# Altium footprint library PcbLib1.PcbLib: 10 footprints
Each footprint in its own frame and in the unit in brackets; x right, y up, seen from the top. Pads: shape width x height; smd on the part's side, far side on the other; paste and mask are expansions set on the pad; w line width, h text height; cw(c..) or ccw(c..) is an arc to the next point about the centre after c.
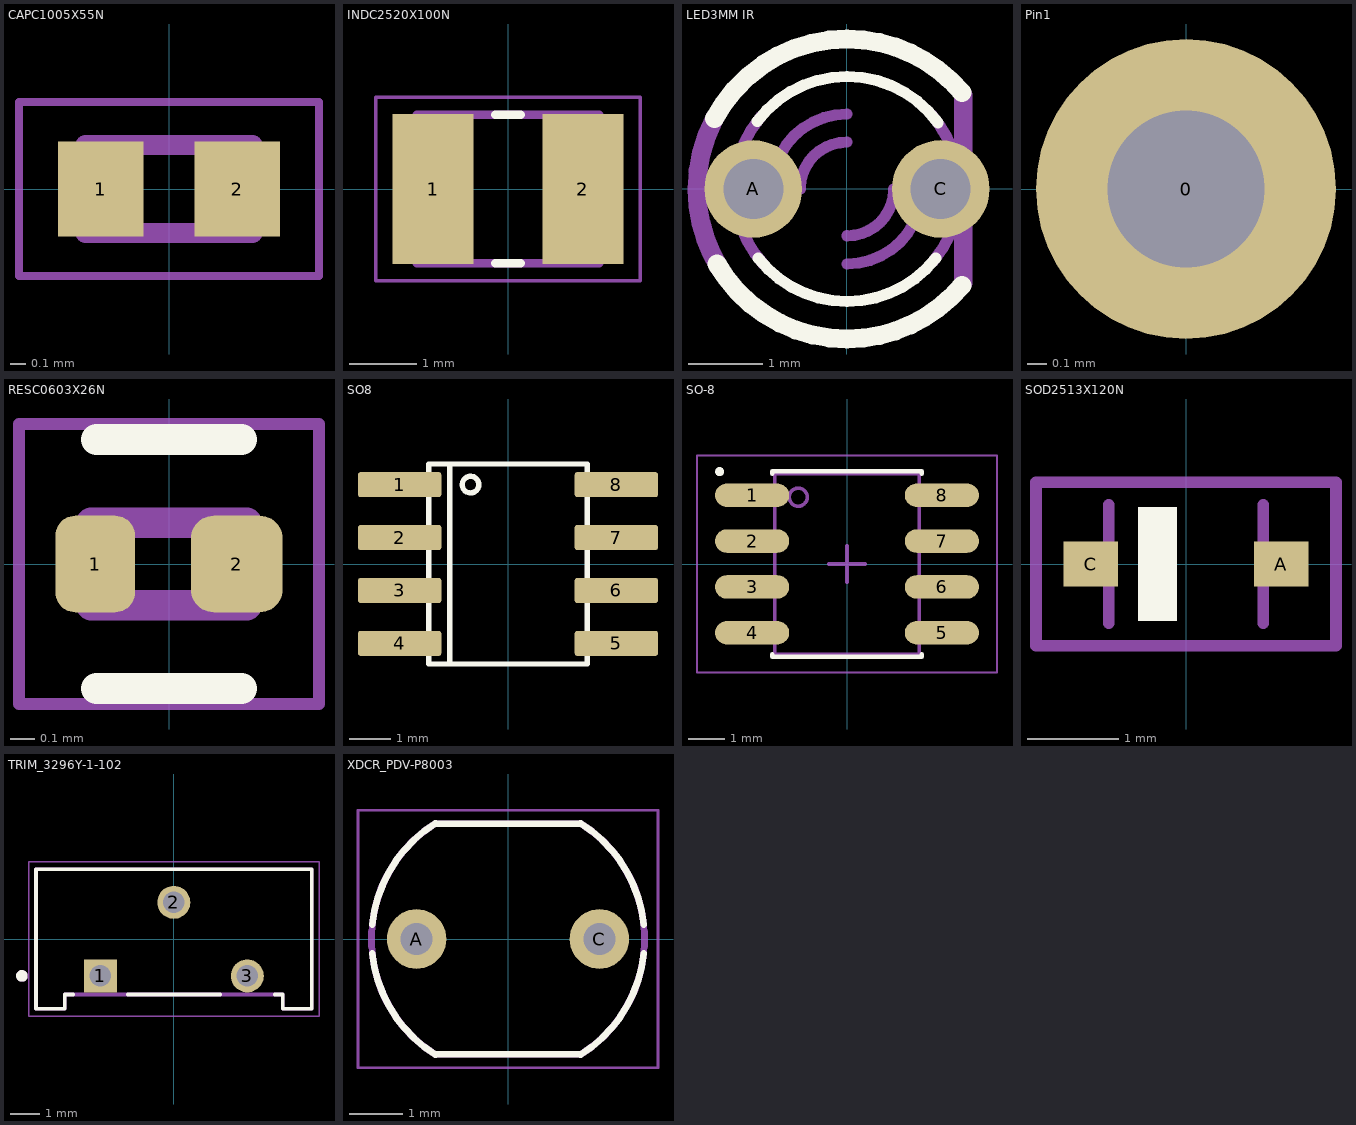
[diagram p0: the footprints below, top view; thin cyan lines are the x and y axes]

## CAPC1005X55N [mm]
pads (2):
  rect 0.54x0.6 smd: 1(-0.432,0) 2(0.432,0)
Mechanical 13:
  lines w0.127: -0.53,-0.28 0.53,-0.28 0.53,0.28 -0.53,0.28 -0.53,-0.28
Top Courtyard:
  lines w0.05: -0.95,-0.55 0.95,-0.55 0.95,0.55 -0.95,0.55 -0.95,-0.55
3D body "step_temp.STEP": height 0.55, standoff 0, extent -0.5,-0.25 0.5,0.25

## INDC2520X100N [mm]
pads (2):
  rect 1.2x2.22 smd: 1(-1.11,0) 2(1.11,0)
Top Overlay:
  lines w0.127: -0.19,-1.1 0.19,-1.1 ; -0.19,1.1 0.19,1.1
Mechanical 13:
  lines w0.127: -1.35,-1.1 -1.35,1.1 1.35,1.1 1.35,-1.1 -1.35,-1.1
Top Courtyard:
  lines w0.05: -1.958,-1.358 -1.958,1.358 1.958,1.358 1.958,-1.358 -1.958,-1.358
3D body "step_temp.STEP": height 1, standoff 0, extent -1.25,-1 1.25,1

## LED3MM IR [mil]
pads (2):
  round 52 hole 32: A(-50,0) C(50,0)
Top Overlay:
  lines w6: -47.92,36.11 cw(c0,0) 0,60 cw(c0,0) 48.54,35.27 ; -47.28,-36.94 ccw(c0,0) 0,-60 ccw(c0,0) 47.28,-36.94
  lines w10: -70.63,37.56 cw(c0,0) 0,80 cw(c0,0) 61.28,51.42 ; -69.28,-40 ccw(c0,0) 0,-80 ccw(c0,0) 61.29,-51.42
Mechanical 13:
  lines w6: -45.96,38.57 ccw(c0,0) -60,0 ccw(c0,0) -44.59,-40.15 ; -40,0 cw(c0,0) 0,40 ; -25,0 cw(c0,0) 0,25 ; 0,-40 ccw(c0,0) 40,0 ; 0,-25 ccw(c0,0) 25,0 ; 45.28,39.36 cw(c0,0) 60,0 cw(c0,0) 45.96,-38.57
  lines w10: -70.64,37.56 ccw(c0,0) -80,0 ccw(c0,0) -67.84,-42.4 ; 62,-50 62,50
3D body "step_temp.STEP": height 240.16, standoff -1133.86, extent -59.84,-62.49 59.84,62.49

## Pin1 [mil]
pads (1):
  round 60 hole 31.5: 0(0,0)

## RESC0603X26N [mm]
pads (2):
  rrect50% 0.33x0.4 smd: 1(-0.305,0)
  rrect50% 0.38x0.4 smd: 2(0.28,0)
Top Overlay:
  lines w0.127: -0.3,-0.515 0.3,-0.515 ; -0.3,0.515 0.3,0.515
Mechanical 13:
  lines w0.127: -0.32,-0.17 -0.32,0.17 0.32,0.17 0.32,-0.17 -0.32,-0.17
Top Courtyard:
  lines w0.05: -0.62,-0.579 -0.62,0.579 0.62,0.579 0.62,-0.579 -0.62,-0.579
3D body "step_temp.STEP": height 0.26, standoff 0, extent -0.3,-0.15 0.3,0.15

## SO8 [mm]
pads (8):
  rrect20% 2x0.6 smd paste+0 mask+0.102: 1(-2.6,1.905) 2(-2.6,0.635) 3(-2.6,-0.635) 4(-2.6,-1.905) 5(2.6,-1.905) 6(2.6,-0.635) 7(2.6,0.635) 8(2.6,1.905)
Top Overlay:
  circle w0.127: c-0.9,1.905 r0.2
  lines w0.127: -1.4,-2.4 -1.9,-2.4 -1.9,2.4 -1.4,2.4 ; -1.4,-2.4 1.9,-2.4 1.9,2.4 -1.4,2.4 ; -1.4,-2.4 -1.4,2.4
Mechanical 13:
  region: 3.1,1.66 2,1.66 2,2.15 3.1,2.15
  region: 3.1,0.39 2,0.39 2,0.88 3.1,0.88
  region: 3.1,-0.88 2,-0.88 2,-0.39 3.1,-0.39
  region: 3.1,-2.15 2,-2.15 2,-1.66 3.1,-1.66
  region: -2,-2.15 -3.1,-2.15 -3.1,-1.66 -2,-1.66
  region: -2,-0.88 -3.1,-0.88 -3.1,-0.39 -2,-0.39
  region: -2,0.39 -3.1,0.39 -3.1,0.88 -2,0.88
  region: -2,1.66 -3.1,1.66 -3.1,2.15 -2,2.15
3D body "step_temp.STEP": height 1.75, standoff 0, extent -3,-2.45 3,2.45

## SO-8 [mm] "SOP, 8-Leads, Body 4,90x3,90mm, Pitch 1,27mm, IPC Low Density"
height 1.75
pads (8):
  oval 2.05x0.65 smd: 1(-2.625,1.905) 2(-2.625,0.635) 3(-2.625,-0.635) 4(-2.625,-1.905) 5(2.625,-1.905) 6(2.625,-0.635) 7(2.625,0.635) 8(2.625,1.905)
Top Overlay:
  circle w0.125: c-3.525,2.555 r0.062
  lines w0.127: -2.064,-2.494 -2.064,-2.564 2.063,-2.564 2.063,-2.494 ; -2.064,2.494 -2.064,2.564 2.063,2.564 2.063,2.494
Top Assembly:
  circle w0.1: c-1.35,1.85 r0.25
  lines w0.1: -2,-2.5 2,-2.5 2,2.5 -2,2.5 -2,-2.5
Top Designator:
  text ".Designator" at 0,0.188 h1
Top Courtyard:
  lines w0.05: -4.15,-3 4.15,-3 4.15,3 -4.15,3 -4.15,-3
Top Component Center:
  lines w0.1: -0.5,0 0.5,0 ; 0,-0.5 0,0.5
3D body "SO-8.step": height 1.75, standoff 0, extent -3,-2.45 3,2.45

## SOD2513X120N [mm]
pads (2):
  rect 0.6x0.5 smd: A(1.05,0) C(-1.05,0)
Top Overlay:
  region: -0.1,-0.626 -0.526,-0.626 -0.526,0.625 -0.1,0.625
Mechanical 13:
  lines w0.127: -0.85,-0.65 -0.85,0.65 ; 0.85,-0.65 0.85,0.65
Top Courtyard:
  lines w0.127: -1.65,-0.9 -1.65,0.9 1.65,0.9 1.65,-0.9 -1.65,-0.9
3D body "step_temp.STEP": height 1.2, standoff 0, extent -1.25,-0.65 1.25,0.65

## TRIM_3296Y-1-102 [mm]
height 11.8
pads (3):
  rect 1.14x1.14 / inner round 1.14 / far side rect 1.14x1.14 hole 0.74: 1(-2.54,-1.27)
  round 1.14 hole 0.74: 2(0,1.27) 3(2.54,-1.27)
Top Overlay:
  circle w0.2: c-5.25,-1.27 r0.1
  lines w0.127: -3.484,-1.91 -3.765,-1.91 -3.765,-2.41 -4.765,-2.41 -4.765,2.42 4.765,2.42 4.765,-2.41 3.765,-2.41 3.765,-1.91 3.484,-1.91 ; -1.596,-1.91 1.596,-1.91
Mechanical 13:
  circle w0.2: c-5.25,-1.27 r0.1
  lines w0.127: -4.765,-2.41 -3.765,-2.41 -3.765,-1.91 3.765,-1.91 3.765,-2.41 4.765,-2.41 4.765,2.42 -4.765,2.42 -4.765,-2.41
Top Courtyard:
  lines w0.05: -5.015,-2.66 -5.015,2.67 5.015,2.67 5.015,-2.66 -5.015,-2.66
3D body "step_temp.STEP": height 11.55, standoff -7.72, extent -4.765,-2.415 4.765,2.415

## XDCR_PDV-P8003 [mm]
pads (2):
  round 1.108 hole 0.6: A(-1.7,0) C(1.7,0)
Top Overlay:
  lines w0.127: -2.526,-0.265 ccw(c0.001,0.001) -1.346,-2.154 ; -2.526,0.265 cw(c0.001,-0.001) -1.346,2.154 ; -1.36,2.145 1.36,2.145 ; 1.346,-2.154 ccw(c-0.001,0.001) 2.526,-0.265 ; 1.346,2.154 cw(c-0.001,-0.001) 2.526,0.265 ; 1.36,-2.145 -1.36,-2.145 ; -1.36,-2.145 -1.36,-2.145 ; 1.36,2.145 1.36,2.145
Mechanical 13:
  lines w0.127: -1.36,-2.145 1.36,-2.145 ; -1.36,2.145 1.36,2.145 ; -1.346,-2.154 cw(c0,0) -1.346,2.154 ; 1.346,-2.154 ccw(c0,0) 1.346,2.154
Top Courtyard:
  lines w0.05: -2.79,-2.395 2.79,-2.395 2.79,2.395 -2.79,2.395 -2.79,-2.395
3D body "step_temp.STEP": height 2.38, standoff -26, extent -2.54,-2.145 2.54,2.145